# Altium schematic symbol library Connector-2.SchLib: 96 symbols (part 1 of 2)
Pins are listed as number, name and electrical type; pins without a type are passive.

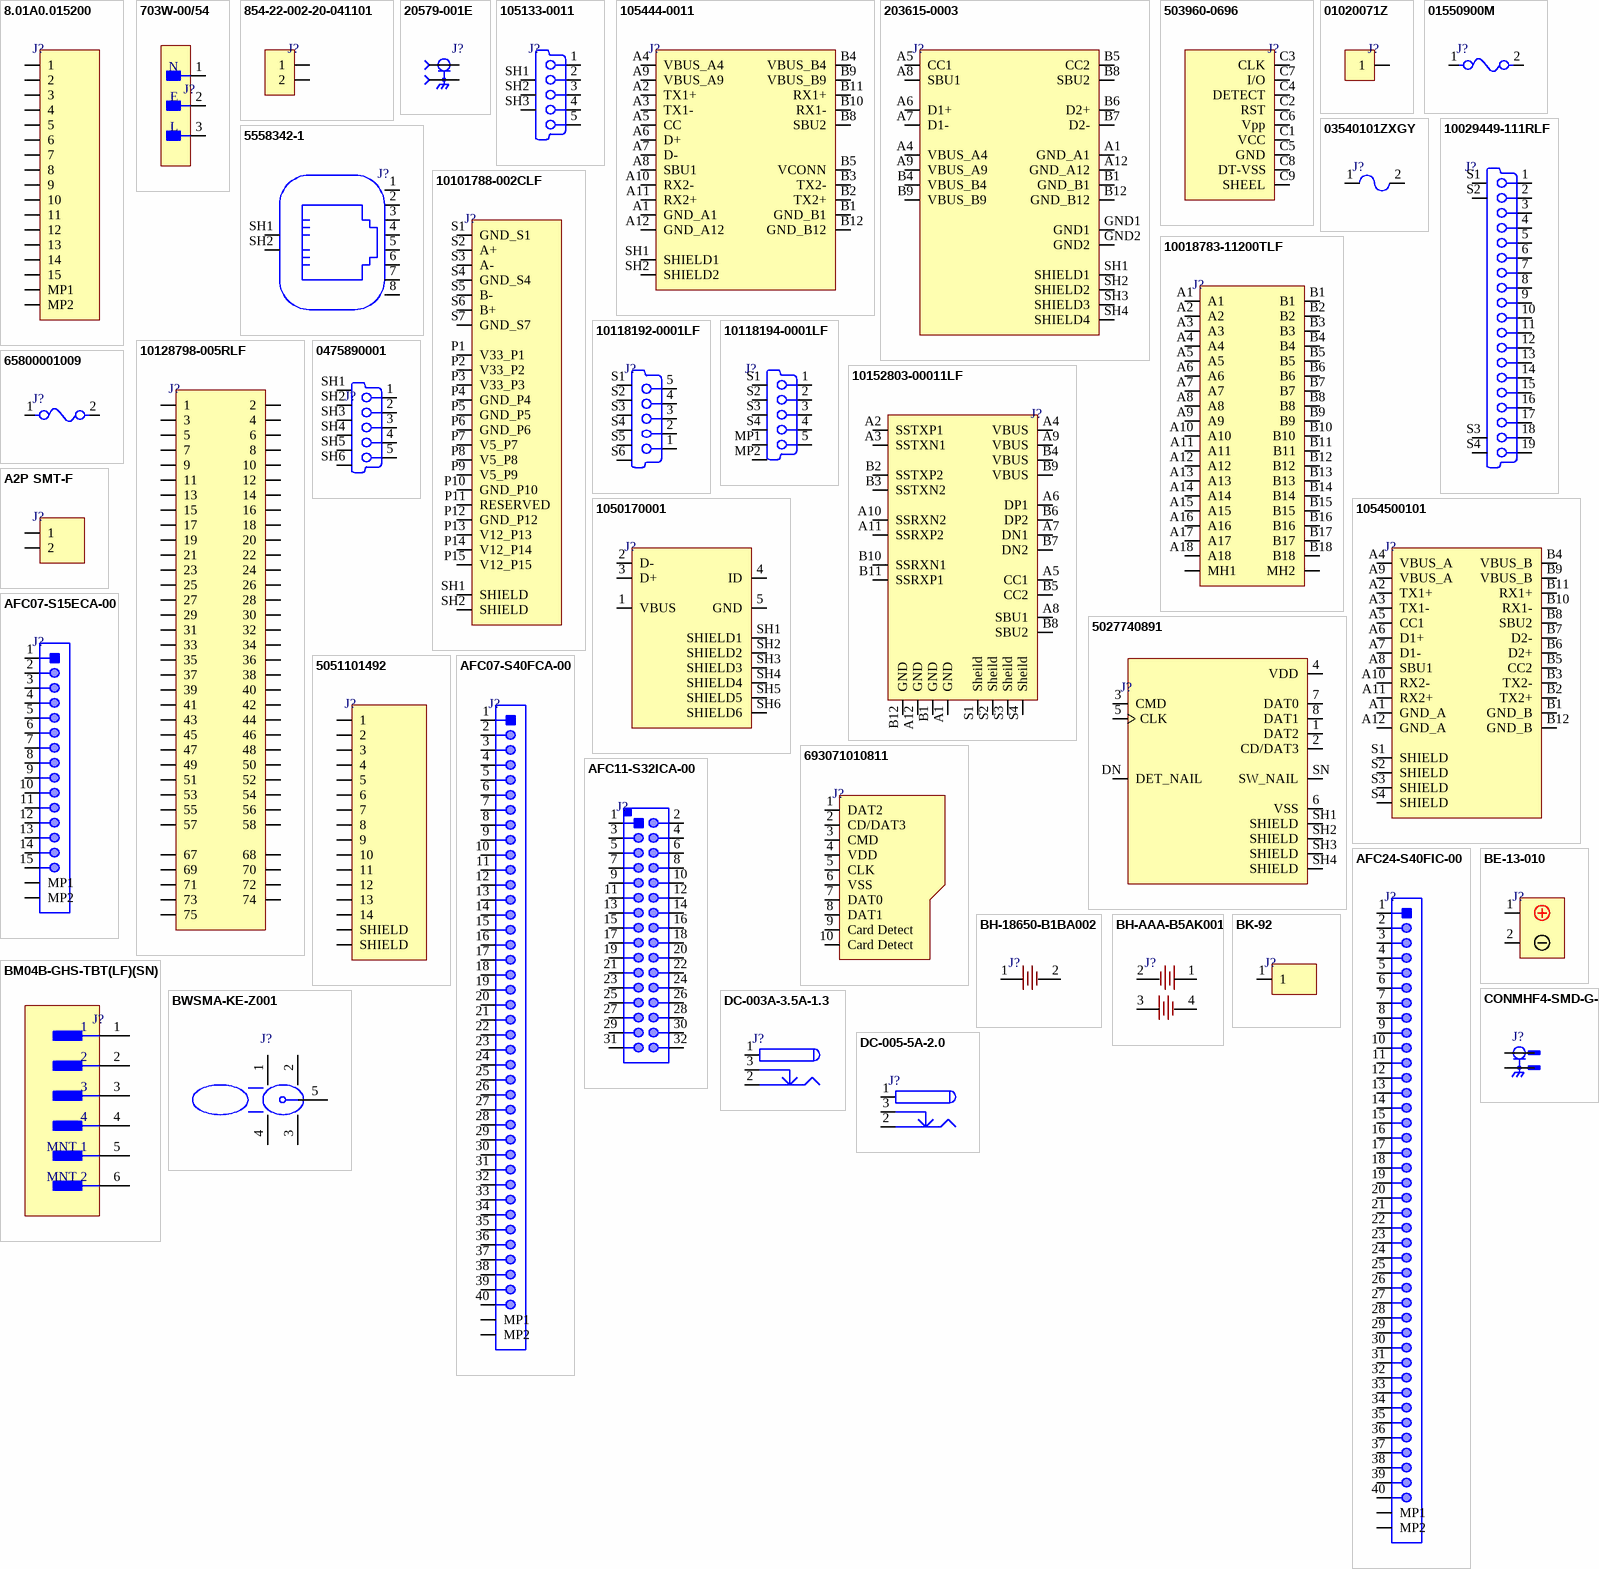
[diagram p0: symbols 8.01A0.015200 to DC-005-5A-2.0]

## 8.01A0.015200
designator J?
-40℃~+80℃ 15P Dual-sided contacts / top and bottom connection 0.5mm SMD,P=0.5mm,Surface Mount，Right Angle FFC, FPC (Flat Flexible) Connector Assemblies ROHS; Manufacturer: DIANWEI; Manufacturer Part Number: 8.01A0.015200; Item Type: FFC, FPC Connector; Package: SMD,P=0.5mm,Surface Mount，Right Angle; LCSC Part Number: C19188796; ComponentLink1Description: LCSC; ComponentLink1URL: https://www.lcsc.com/product-detail/FFC-FPC-Flat-Flexible-Connector-Assemblies_DIANWEI-8-01A0-015200_C19188796.html?s_z=n_HC-FPC-05-20-15RLTAG
footprint 8.01A0.015200
pins: 1, 2, 3, 4, 5, 6, 7, 8, 9, 10, 11, 12, 13, 14, 15, MP1, MP2

## 703W-00/54
designator J?
PWR ENT RCPT IEC320-C14 PNL SLDR; Manufacturer: Qualtek; Manufacturer Part Number: 703W-00/54; Item Type: Power Connectors; Supplier: Digikey; Supplier Part Number: Q220-ND; RoHS: Yes; Stock: 6999; Pricing: 1=2.02, 10=1.541, 25=1.3868, 50=1.282, 100=1.1867, 300=1.0531, 500=0.99762, 1000=0.92847, 2500=0.84695 (USD); ComponentLink1URL: https://datasheet.ciiva.com/1115/703w0054-1115060.pdf?src-supplier=Newark; ComponentLink1Description: https://datasheet.ciiva.com/1115/703w0054-1115060.pdf?src-supplier=Newark; ComponentLink2URL: https://datasheet.ciiva.com/12348/703w0054-56908-12348569.pdf?src-supplier=Mouser; ComponentLink2Description: https://datasheet.ciiva.com/12348/703w0054-56908-12348569.pdf?src-supplier=Mouser; ComponentLink3URL: https://datasheet.ciiva.com/16707/70133351-16707751.pdf?src-supplier=Allied+Electronics; ComponentLink3Description: https://datasheet.ciiva.com/16707/70133351-16707751.pdf?src-supplier=Allied+Electronics; ComponentLink4URL: https://datasheet.ciiva.com/691/703w0054-691309.pdf?src-supplier=Digikey; ComponentLink4Description: https://datasheet.ciiva.com/691/703w0054-691309.pdf?src-supplier=Digikey
footprint 703W-00/54
pins: 1 N, 2 E, 3 L

## 854-22-002-20-041101
designator J?
2 Position Spring Piston Connector Through Hole, Right Angle; Manufacturer: Mill-Max; Manufacturer Part Number: 854-22-002-20-041101; Item Type: Spring Loaded; Supplier: Digikey; Supplier Part Number: 54-854-22-002-20-041101-ND; RoHS: No; Pricing: 1=3.53, 10=3.002, 25=2.8136, 50=2.679, 100=2.551, 250=2.39124, 500=2.27716, 1000=2.16851, 2500=2.03287 (USD)
footprint 854-22-002-20-041101
pins: 1, 2

## 20579-001E
designator J?
MHF 4L RECEPTACLE; Manufacturer: I-PEX; Manufacturer Part Number: 20579-001E; Item Type: RF / Coaxial Connectors; Impedance: 50R; Number of Contacts: 1NUMBER; Voltage Rating: 60V; Supplier: Digikey; Supplier Part Number: 5378-20579-001ECT-ND; RoHS: No; Stock: 16372; Pricing: 1=1.4, 10=1.145, 25=1.0552, 50=0.992, 100=0.9328, 250=0.85996, 500=0.8087, 1000=0.76051, 2500=0.70122 (USD); Contact Material: 153,157ConductorMaterial; Min Operating Temperature: -40°C; Max Operating Temperature: 90°C; Height: 700um; ComponentLink1URL: http://datasheet.octopart.com/20579-001E-I-PEX-datasheet-154856145.pdf?src-supplier=Digikey; ComponentLink1Description: http://datasheet.octopart.com/20579-001E-I-PEX-datasheet-154856145.pdf?src-supplier=Digikey; ComponentLink2URL: https://datasheet.octopart.com/20579-001E-I-PEX-datasheet-154856145.pdf?src-supplier=Future+Electronics; ComponentLink2Description: https://datasheet.octopart.com/20579-001E-I-PEX-datasheet-154856145.pdf?src-supplier=Future+Electronics
footprint 20579-001E
pins: 1 SIGNAL, G1 GROUND, G2 GROUND, G3 GROUND

## 105133-0011
designator J?
CONN RCPT USB2.0 MICRO B SMD; Manufacturer: Molex; Manufacturer Part Number: 105133-0011; Connector Type: TELECOM AND DATACOM CONNECTOR; Option: General Purpose; Contact Resistance: 30mR; Contact Style: USB; Dielectric Withstanding Voltage (AC): 140V; Durability: 10000Cycles; Empty Shell: No; Insulation Resistance: 1GR; Number Of Connectors: 1; PCB Contact Pattern: RECTANGULAR; Polarization Key: POLARIZED HOUSING; Rated Current (Signal): 1A; Number of Contacts: 5; Body Breadth: 0.118inch; Body Depth: 0.264inch; Body Length: 0.315inch; Mounting Option 1: LOCKING; Reference Standard: UL; Reliability: COMMERCIAL; Item Type: USB B Connector; Supplier 1: Avnet; RoHS: Yes; Category: USB Connectors; Stock 1: 12800; Pricing 1: 500=1.01170 (USD); Mounting Technology: Board; Contact Material: Copper Alloy; Contact Finish - Mating: NOT SPECIFIED; Contact Finish - Termination: Gold (Au) - with Nickel (Ni) barrier; Insulation Material: Polyethylene; Shell Finish: Tin; Shell Material: Stainless Steel; Min Operating Temperature: -30°C; Max Operating Temperature: 85°C; JESD-609 Code: e4; Contact Gender: Female; Filter Feature: No; Mixed Contacts: No; Mounting Style: STRAIGHT; Number Of PCB Rows: 1; Termination: SMD/SMT; Terminal Pitch: 0.6604mm; Flammability Rating: UL94 V-0; Reach SVHC Compliant: Yes; RoHS Compliant: Yes; DIN Conformance: No; IEC Conformance: No; MIL Conformance: No; ComponentLink1URL: https://datasheet.ciiva.com:443/pdfs/VipMasterIC/IC/MOLE/MOLE-S-A0000025294/MOLE-S-A0000025294-1.pdf?src-supplier=IHS+Markit; ComponentLink1Description: https://datasheet.ciiva.com:443/pdfs/VipMasterIC/IC/MOLE/MOLE-S-A0000025294/MOLE-S-A0000025294-1.pdf?src-supplier=IHS+Markit; ComponentLink2URL: https://datasheet.ciiva.com/29660/1051330011-sd-29660273.pdf?src-supplier=Digi-Key; ComponentLink2Description: https://datasheet.ciiva.com/29660/1051330011-sd-29660273.pdf?src-supplier=Digi-Key; ComponentLink3URL: https://datasheet.ciiva.com/15181/getdatasheetpartid-719072-15181485.pdf?src-supplier=Verical; ComponentLink3Description: https://datasheet.ciiva.com/15181/getdatasheetpartid-719072-15181485.pdf?src-supplier=Verical; Supplier Part Number 1: 105133-0011; LCSC Part Number: C586226
footprint 1051330011
pins: 1 V BUS (5V) "USB Vcc [Red]", 2 D- "USB Data - [White]", 3 D+ "USB Data + [Green]", 4 ID, 5 GND "Ground [Black]", SH1 "Shell", SH2 "Shell", SH3 "Shell"

## 105444-0011
designator J?
CONN PLUG USB3.1 TYPEC BRD EDGE; Manufacturer: Molex; Manufacturer Part Number: 105444-0011; Item Type: Type-C Connector; Supplier: Mouser; Supplier Part Number: 538-105444-0011; RoHS: Yes; Category: USB Connectors; Stock: 9840; Pricing: 1=2.88, 10=2.46, 50=2.46, 100=2.07, 1000=1.69, 10000=1.55 (USD); ComponentLink1URL: http://www.molex.com/pdm_docs/sd/1054440011_sd.pdf?src-supplier=Digi-Key; ComponentLink1Description: http://www.molex.com/pdm_docs/sd/1054440011_sd.pdf?src-supplier=Digi-Key; LCSC Part Number: C561769
footprint 1054440011
pins: A1 GND_A1, A2 TX1+, A3 TX1-, A4 VBUS_A4, A5 CC, A6 D+, A7 D-, A8 SBU1, A9 VBUS_A9, A10 RX2-, A11 RX2+, A12 GND_A12, B1 GND_B1, B2 TX2+, B3 TX2-, B4 VBUS_B4, B5 VCONN, B8 SBU2, B9 VBUS_B9, B10 RX1-, B11 RX1+, B12 GND_B12, SH1 SHIELD1, SH2 SHIELD2

## 203615-0003
designator J?
USB C RECEPTACLE, 16PIN; Manufacturer: Molex; Manufacturer Part Number: 203615-0003; Item Type: Connectors; Dielectric Material: 4303ConductorMaterial; Contact Resistance: 50mR; Current Rating: 5A; Insulation Resistance: 100MR; Number of Ports: 1NUMBER; Plating Thickness: 762nm; Row Spacing: 1.25mm; Supplier: Mouser; Supplier Part Number: 538-203615-0003; RoHS: No; Stock: 9511; Pricing: 1=3.44, 10=2.81, 50=2.43, 100=2.29, 1000=2.01, 10000=1.99 (USD); Pins: 16NUMBER; Shell Finish: 153ConductorMaterial; Shell Material: 156ConductorMaterial; Min Operating Temperature: -40°C; Max Operating Temperature: 85°C; Contact Gender: 30Gender; Number of Rows: 2NUMBER; Terminal Pitch: 500um; Reach SVHC Compliant: 4188SVHC; ComponentLink1URL: https://datasheet.octopart.com/203615-0003-Molex-datasheet-176111458.pdf?src-supplier=Farnell; ComponentLink1Description: https://datasheet.octopart.com/203615-0003-Molex-datasheet-176111458.pdf?src-supplier=Farnell; ComponentLink2URL: https://datasheet.octopart.com/203615-0003-Molex-datasheet-176111458.pdf?src-supplier=Element14; ComponentLink2Description: https://datasheet.octopart.com/203615-0003-Molex-datasheet-176111458.pdf?src-supplier=Element14
footprint 2036150003
pins: A1 GND_A1, A4 VBUS_A4, A5 CC1, A6 D1+, A7 D1-, A8 SBU1, A9 VBUS_A9, A12 GND_A12, B1 GND_B1, B4 VBUS_B4, B5 CC2, B6 D2+, B7 D2-, B8 SBU2, B9 VBUS_B9, B12 GND_B12, GND1, GND2, SH1 SHIELD1, SH2 SHIELD2, SH3 SHIELD3, SH4 SHIELD4

## 503960-0696
designator J?
CONN MICRO SIMM PUSH-PUSH R/A; Manufacturer: Molex; Manufacturer Part Number: 503960-0696; Item Type: Memory Connectors; Plating: Gold; Current Rating: 500mA; Number of Circuits: 6; Number of Contacts: 8; Voltage Rating: 10V; Supplier: Arrow Electronics; LCSC Part Number: C132719; RoHS: Yes; Stock: 4105; Pricing: 1=1.7339, 10=1.4783, 25=1.4697, 50=1.441, 100=1.3312, 250=1.3227, 500=1.2003, 1600=1.1948, 3200=1.1943 (USD); Contact Material: Nickel,Gold; Contact Plating: Gold; Housing Material: Stainless Steel; Min Operating Temperature: -25°C; Max Operating Temperature: 85°C; Height: 1.5mm; RoHS Compliant: Yes; ComponentLink1URL: http://datasheet.octopart.com/5039600696-Molex-datasheet-148167723.pdf?src-supplier=Rs; ComponentLink1Description: http://datasheet.octopart.com/5039600696-Molex-datasheet-148167723.pdf?src-supplier=Rs; ComponentLink2URL: http://datasheet.octopart.com/5039600696-Molex-datasheet-148167723.pdf?src-supplier=Farnell; ComponentLink2Description: http://datasheet.octopart.com/5039600696-Molex-datasheet-148167723.pdf?src-supplier=Farnell; ComponentLink3URL: http://datasheet.octopart.com/5039600696-Molex-datasheet-148167723.pdf?src-supplier=Avnet; ComponentLink3Description: http://datasheet.octopart.com/5039600696-Molex-datasheet-148167723.pdf?src-supplier=Avnet; ComponentLink4URL: http://datasheet.octopart.com/5039600696-Molex-datasheet-148167723.pdf?src-supplier=Arrow+Electronics; ComponentLink4Description: http://datasheet.octopart.com/5039600696-Molex-datasheet-148167723.pdf?src-supplier=Arrow+Electronics; ComponentLink5URL: http://datasheet.octopart.com/5039600696-Molex-datasheet-148167723.pdf?src-supplier=Onlinecomponents.com; ComponentLink5Description: http://datasheet.octopart.com/5039600696-Molex-datasheet-148167723.pdf?src-supplier=Onlinecomponents.com; ComponentLink6URL: http://datasheet.octopart.com/5039600696-Molex-datasheet-148167723.pdf?src-supplier=Verical; ComponentLink6Description: http://datasheet.octopart.com/5039600696-Molex-datasheet-148167723.pdf?src-supplier=Verical; ComponentLink7URL: http://datasheet.octopart.com/5039600696-Molex-datasheet-148167723.pdf?src-supplier=Electro+Sonic; ComponentLink7Description: http://datasheet.octopart.com/5039600696-Molex-datasheet-148167723.pdf?src-supplier=Electro+Sonic
footprint 5039600696
pins: C1 VCC, C2 RST, C3 CLK, C4 DETECT, C5 GND, C6 Vpp, C7 I/O, C8 DT-VSS, C9 SHEEL

## 01020071Z
designator J?
FUSE CLIP CARTRIDGE 250V 15A PCB; Manufacturer: Littelfuse; Manufacturer Part Number: 01020071Z; Item Type: Fuse Holder; Supplier: Digikey; LCSC Part Number: C142745; RoHS: Yes; Stock: 48674; Pricing: 1=0.27, 5=0.228, 10=0.21, 50=0.1754, 100=0.1622, 250=0.14612, 500=0.13502, 1000=0.12473, 5000=0.1036 (USD); Lead Free: 5697LeadFree; ComponentLink1URL: https://datasheet.ciiva.com/30471/0900766b8128f6e8-30471828.pdf?src-supplier=Rs; ComponentLink1Description: https://datasheet.ciiva.com/30471/0900766b8128f6e8-30471828.pdf?src-supplier=Rs; ComponentLink2URL: https://datasheet.ciiva.com/14119/102-series-eng-tds-14119839.pdf?src-supplier=Distrelec; ComponentLink2Description: https://datasheet.ciiva.com/14119/102-series-eng-tds-14119839.pdf?src-supplier=Distrelec; ComponentLink3URL: https://datasheet.ciiva.com/1269/1480080-1269262.pdf?src-supplier=Element14; ComponentLink3Description: https://datasheet.ciiva.com/1269/1480080-1269262.pdf?src-supplier=Element14; ComponentLink4URL: https://datasheet.ciiva.com/1270/littelfuse-fuse-clips-1270929.pdf?src-supplier=Element14; ComponentLink4Description: https://datasheet.ciiva.com/1270/littelfuse-fuse-clips-1270929.pdf?src-supplier=Element14; ComponentLink5URL: https://datasheet.ciiva.com/295/littelfuse-fuse-clips-295516.pdf?src-supplier=Digikey; ComponentLink5Description: https://datasheet.ciiva.com/295/littelfuse-fuse-clips-295516.pdf?src-supplier=Digikey; ComponentLink6URL: https://datasheet.ciiva.com/15201/getdatasheetpartid-336939-15201068.pdf?src-supplier=Verical; ComponentLink6Description: https://datasheet.ciiva.com/15201/getdatasheetpartid-336939-15201068.pdf?src-supplier=Verical
footprint 01020071Z
pins: 1

## 01550900M
designator J?
FUSE BLOK CARTRIDGE 125V 10A SMD; Manufacturer: Littelfuse; Manufacturer Part Number: 01550900M; Item Type: Fuse Holders; Supplier: Digikey; LCSC Part Number: C108518; RoHS: Yes; Stock: 4038; Pricing: 1=2.5, 5=2.072, 10=1.912, 50=1.586, 100=1.4631, 250=1.31448, 500=1.21164, 1000=1.11633, 5000=1.06138 (USD); Lead Free: 5697LeadFree; Reach SVHC Compliant: 4187SVHC; ComponentLink1URL: https://datasheet.ciiva.com/3812/01550900m-3812998.pdf?src-supplier=Arrow+Electronics; ComponentLink1Description: https://datasheet.ciiva.com/3812/01550900m-3812998.pdf?src-supplier=Arrow+Electronics
footprint 01550900M
pins: 1, 2

## 03540101ZXGY
designator J?
FUSE BLOCK CART 600V 15A PCB; Manufacturer: Littelfuse; Manufacturer Part Number: 03540101ZXGY; Body Material: Bronze,Tin; Voltage Rating: 300V; Number of Poles: 1; Fuse Size: 0.25 Dia x 1.26 L (6.35mm x 32mm); Supplier: Rs; Supplier Part Number: 1740648; RoHS: Yes; Category: Fuse Holders; Stock: 169; Mounting Technology: Through Hole; Case/Package: 300; Contact Material: Bronze; Contact Plating: Tin; Material: Thermoplastic; Color: Grey; Min Operating Temperature: -40°C; Max Operating Temperature: 85°C; Current Rating: 15A; Package Quantity: 50; Packaging: Bulk; Voltage Rating (DC): 300V; Voltage Rating (AC): 300V; Number of Circuits: 1; Voltage: 600V; Termination: PC Pin; Fuse Current: 15A; Orientation: Horizontal; Series: OMNI-BLOK® 354; Length: 12.7mm; Width: 12.7mm; Depth: 35.56mm; Reach SVHC Compliant: No; Lead Free: Lead Free; Flammability Rating: UL94 V-0; ComponentLink1URL: https://datasheet.ciiva.com/15187/getdatasheetpartid-114928-15187899.pdf?src-supplier=Verical; ComponentLink1Description: https://datasheet.ciiva.com/15187/getdatasheetpartid-114928-15187899.pdf?src-supplier=Verical; ComponentLink2URL: https://datasheet.ciiva.com/16208/354-omniblok-16208437.pdf?src-supplier=Future+Electronics; ComponentLink2Description: https://datasheet.ciiva.com/16208/354-omniblok-16208437.pdf?src-supplier=Future+Electronics; ComponentLink3URL: https://datasheet.ciiva.com/1269/354-omniblok-1269606.pdf?src-supplier=Element14; ComponentLink3Description: https://datasheet.ciiva.com/1269/354-omniblok-1269606.pdf?src-supplier=Element14
footprint 03540101ZXGY
pins: 1, 2

## 5558342-1
designator J?
CONN MOD JACK 8P8C R/A SHIELDED; Manufacturer: TE Connectivity; Manufacturer Part Number: 5558342-1; Item Type: Ethernet Connectors; Current Rating: 200mA; Circuit Application: 5778ConnectorType; Plating Thickness: 1.27um; Supplier: Future Electronics; LCSC Part Number: C305973; RoHS: No; Stock: 5400; Pricing: 1=2.48, 25=2.38, 75=2.32, 90=2.34, 180=2.3, 200=2.26, 270=2.28, 450=2.25, 500=2.15, 900=2.19 (USD); Lead Free: 5697LeadFree; ComponentLink1URL: https://datasheet.ciiva.com/8007/1637342-8007798.pdf?src-supplier=Element14; ComponentLink1Description: https://datasheet.ciiva.com/8007/1637342-8007798.pdf?src-supplier=Element14; ComponentLink2URL: https://datasheet.ciiva.com/15170/getdatasheetpartid-155261-15170633.pdf?src-supplier=Verical; ComponentLink2Description: https://datasheet.ciiva.com/15170/getdatasheetpartid-155261-15170633.pdf?src-supplier=Verical; ComponentLink3URL: https://datasheet.ciiva.com/30494/0900766b8121ec01-30494367.pdf?src-supplier=Rs; ComponentLink3Description: https://datasheet.ciiva.com/30494/0900766b8121ec01-30494367.pdf?src-supplier=Rs; ComponentLink4URL: https://datasheet.ciiva.com/685/eng-cd-5558342-f-basefilename-685330.pdf?src-supplier=Digikey; ComponentLink4Description: https://datasheet.ciiva.com/685/eng-cd-5558342-f-basefilename-685330.pdf?src-supplier=Digikey; ComponentLink5URL: https://datasheet.ciiva.com/19457/958999-19457716.pdf?src-supplier=Jameco; ComponentLink5Description: https://datasheet.ciiva.com/19457/958999-19457716.pdf?src-supplier=Jameco; ComponentLink6URL: https://datasheet.ciiva.com/14618/70042946-14618796.pdf?src-supplier=Allied+Electronics; ComponentLink6Description: https://datasheet.ciiva.com/14618/70042946-14618796.pdf?src-supplier=Allied+Electronics; ComponentLink7URL: https://datasheet.ciiva.com/30242/eng-cs-82066-mod-jacks-and-mrj21-prod-single-1107-30242663.pdf?src-supplier=Onlinecomponents.com; ComponentLink7Description: https://datasheet.ciiva.com/30242/eng-cs-82066-mod-jacks-and-mrj21-prod-single-1107-30242663.pdf?src-supplier=Onlinecomponents.com; ComponentLink8URL: https://datasheet.ciiva.com/3138/eng-cs-82066-mod-jacks-and-mrj21-prod-single-1107-3138695.pdf?src-supplier=Avnet; ComponentLink8Description: https://datasheet.ciiva.com/3138/eng-cs-82066-mod-jacks-and-mrj21-prod-single-1107-3138695.pdf?src-supplier=Avnet
footprint 5558342-1
pins: 1, 2, 3, 4, 5, 6, 7, 8, SH1 SHIELD, SH2 SHIELD

## 10018783-11200TLF
designator J?
CONN PCI EXP FEMALE 36POS 0.039; Manufacturer: Amphenol ICC / FCI; Manufacturer Part Number: 10018783-11200TLF; Current Rating: 1.1A; Voltage Rating (AC): 300V; Number of Positions: 36; Insulation Resistance: 1GR; Connector Type: Cantilever; Pitch: 2mm; Board Thickness: 1.56mm; Card Thickness: 0.062inch; Item Type: Connector; Supplier 1: Digi-Key; Stock 1: 0; Pricing 1: 8400=0.19689 (USD); Mount: Through Hole; Contact Material: Copper Alloy; Contact Plating: Gold,Tin,Matte; Color: Black; Housing Color: Black; Housing Material: Nylon; Insulation Material: Nylon; Min Operating Temperature: -55°C; Max Operating Temperature: 85°C; Package Quantity: 70; Packaging: Tray; Gender: Female; Number of Rows: 2; Termination: Solder; Max Voltage Rating (AC): 300V; Orientation: Straight; Series: HPCE™; Contact Type: Cantilever; Length: 25mm; Width: 7.4mm; Lead Free: Lead Free; Flammability Rating: UL94 V-0; RoHS Compliant: Yes; ComponentLink1URL: http://portal.fciconnect.com/Comergent/fci/drawing/10018783.pdf?src-supplier=Avnet; ComponentLink1Description: http://portal.fciconnect.com/Comergent/fci/drawing/10018783.pdf?src-supplier=Avnet; ComponentLink2URL: https://cdn.amphenol-icc.com/media/wysiwyg/files/documentation/gs-12-233.pdf?src-supplier=Digi-Key; ComponentLink2Description: https://cdn.amphenol-icc.com/media/wysiwyg/files/documentation/gs-12-233.pdf?src-supplier=Digi-Key; ComponentLink3URL: http://portal.fciconnect.com/Comergent/en/US/adirect/fci?cmd=catProductDetail&showAddButton=true&productID=1001878311200TLF&src-supplier=Mouser; ComponentLink3Description: http://portal.fciconnect.com/Comergent/en/US/adirect/fci?cmd=catProductDetail&showAddButton=true&productID=1001878311200TLF&src-supplier=Mouser; Supplier Part Number 1: 609-1998-ND; LCSC Part Number: C4689032
footprint 10018783_11200TLF
pins: A1, A2, A3, A4, A5, A6, A7, A8, A9, A10, A11, A12, A13, A14, A15, A16, A17, A18, B1, B2, B3, B4, B5, B6, B7, B8, B9, B10, B11, B12, B13, B14, B15, B16, B17, B18, MH1, MH2

## 10029449-111RLF
designator J?
CONN RCPT 1.4 HDMI 19POS SMD R/A; Manufacturer: Amphenol ICC / FCI; Manufacturer Part Number: 10029449-111RLF; Item Type: HDMI Connector; Supplier 1: RSComponents; RoHS: No; Category: Audio / Video Connectors; Stock 1: 6150; Pricing 1: 1=1471.56000 (GBP); ComponentLink1URL: https://www.verical.com/server-webapp/html/getDatasheet?partID=416866&src-supplier=Verical; ComponentLink1Description: https://www.verical.com/server-webapp/html/getDatasheet?partID=416866&src-supplier=Verical; ComponentLink2URL: http://components.arrow.com/part/dataview/51683435S9285512N8314?src-supplier=Arrow+Electronics; ComponentLink2Description: http://components.arrow.com/part/dataview/51683435S9285512N8314?src-supplier=Arrow+Electronics; ComponentLink3URL: http://portal.fciconnect.com/Comergent/en/US/adirect/fci?cmd=catProductDetail&showAddButton=true&productID=10029449111RLF&src-supplier=Mouser; ComponentLink3Description: http://portal.fciconnect.com/Comergent/en/US/adirect/fci?cmd=catProductDetail&showAddButton=true&productID=10029449111RLF&src-supplier=Mouser; ComponentLink4URL: http://www.amphenol-icc.com/media/wysiwyg/files/drawing/10029449.pdf?src-supplier=Digi-Key; ComponentLink4Description: http://www.amphenol-icc.com/media/wysiwyg/files/drawing/10029449.pdf?src-supplier=Digi-Key; ComponentLink5URL: http://www.farnell.com/datasheets/2562284.pdf?src-supplier=Farnell; ComponentLink5Description: http://www.farnell.com/datasheets/2562284.pdf?src-supplier=Farnell; Supplier Part Number 1: 1822113; LCSC Part Number: C427307
footprint 10029449-111RLF
pins: 1, 2, 3, 4, 5, 6, 7, 8, 9, 10, 11, 12, 13, 14, 15, 16, 17, 18, 19, S1 Shield "Shell", S2 Shield "Shell", S3 Shield "Shell", S4 Shield "Shell"

## 10101788-002CLF
designator J?
CONN SATA PLUG 22POS SLD R/A SMD; Manufacturer: Amphenol ICC / FCI; Manufacturer Part Number: 10101788-002CLF; Item Type: Card Edge Connectors; Current Rating: 1.5A; Gender: Male; Voltage Rating (AC): 500V; Connector Type: Plug,SATA; Number of Positions: 22; Insulation Resistance: 1GR; Supplier: Avnet; Supplier Part Number: 65AC5284; RoHS: Yes; Stock: 1356; Pricing: 1=4.46, 10=4.01, 25=3.86, 50=3.72, 100=3.57 (USD); Mounting Technology: Surface Mount; Color: Black; Contact Plating: Gold; Contact Material: Copper Alloy; Housing Material: Thermoplastic; Package Quantity: 550; Packaging: Tape and Reel; Termination: Solder; Number of Contacts: 22; Orientation: Right Angle; Series: -; Radiation Hardening: No; Lead Free: Lead Free; Flammability Rating: UL94 V-0; RoHS Compliant: Yes; ComponentLink1URL: https://datasheet.ciiva.com/3129/10101788-3129796.pdf?src-supplier=Avnet; ComponentLink1Description: https://datasheet.ciiva.com/3129/10101788-3129796.pdf?src-supplier=Avnet
footprint 10101788-002CLF
pins: P1 V33_P1, P2 V33_P2, P3 V33_P3, P4 GND_P4, P5 GND_P5, P6 GND_P6, P7 V5_P7, P8 V5_P8, P9 V5_P9, P10 GND_P10, P11 RESERVED, P12 GND_P12, P13 V12_P13, P14 V12_P14, P15 V12_P15, S1 GND_S1, S2 A+, S3 A-, S4 GND_S4, S5 B-, S6 B+, S7 GND_S7, SH1 SHIELD, SH2 SHIELD

## 10118192-0001LF
designator J?
CONN RCPT USB2.0 MICRO B SMD R/A; Manufacturer: Amphenol FCI; Manufacturer Part Number: 10118192-0001LF; Gender: Receptacle; Current Rating: 1.8A; Connector Type: USB,Receptacle; Number of Contacts: 5; Number of Ports: 1; Insulation Resistance: 1GR; Max Voltage Rating (AC): 100V; Pitch: 0.65mm; Item Type: USB Connector; Supplier 1: Digi-Key; Stock 1: 32977; Pricing 1: 1=0.43, 10=0.405, 25=0.3648, 50=0.3242, 100=0.3107, 250=0.28368, 500=0.27016 (USD); Mount: Surface Mount,Horizontal; Contact Plating: Gold; Contact Material: Copper Alloy; Color: Black; Number of Terminals: 5; Housing Material: Polymer; Min Operating Temperature: -55°C; Max Operating Temperature: 85°C; Termination: Solder; Packaging: Tape and Reel; Orientation: Right Angle; Package Quantity: 1400; Features: Shielded; Voltage Rating: 100V; USB Standard: USB 2.0; Length: 7.86mm; Depth: 5.57mm; Radiation Hardening: No; Flammability Rating: UL94 V-0; Lead Free: Lead Free; REACH SVHC: No SVHC; ComponentLink1URL: https://cdn.amphenol-icc.com/media/wysiwyg/files/documentation/datasheet/inputoutput/io_usb_micro.pdf?src-supplier=Verical; ComponentLink1Description: https://cdn.amphenol-icc.com/media/wysiwyg/files/documentation/datasheet/inputoutput/io_usb_micro.pdf?src-supplier=Verical; ComponentLink2URL: http://www.amphenol-icc.com/media/wysiwyg/files/drawing/10118192.pdf?src-supplier=Digi-Key; ComponentLink2Description: http://www.amphenol-icc.com/media/wysiwyg/files/drawing/10118192.pdf?src-supplier=Digi-Key; ComponentLink3URL: https://cdn.amphenol-icc.com/media/wysiwyg/files/documentation/datasheet/inputoutput/io_usb_micro.pdf?src-supplier=Mouser; ComponentLink3Description: https://cdn.amphenol-icc.com/media/wysiwyg/files/documentation/datasheet/inputoutput/io_usb_micro.pdf?src-supplier=Mouser; Supplier Part Number 1: 609-4613-6-ND; LCSC Part Number: C132564
footprint 10118192-0001LF_ (CONN RCPT USB2.0 MICRO B SMD R/A)
pins: 1 V BUS (5V) "USB Vcc [Red]", 2 D- "USB Data - [White]", 3 D+ "USB Data + [Green]", 4 NC "Not Connected (or joined to pin 5 via resistor)", 5 GND "Ground [Black]", S1 Shield "Shell", S2 Shield "Shell", S3 Shield "Shell", S4 Shield "Shell", S5 Shield "Shell", S6 Shield "Shell"

## 10118194-0001LF
designator J?
CONN RCPT USB2.0 MICRO B SMD R/A; Manufacturer: Amphenol FCI; Manufacturer Part Number: 10118194-0001LF; Gender: Receptacle; Current Rating: 1.8A; Connector Type: USB,Receptacle; Number of Contacts: 5; Insulation Resistance: 1GR; Number of Ports: 1; Max Voltage Rating (AC): 100V; Pitch: 0.65mm; Item Type: USB B Connector; Supplier 1: Digi-Key; Stock 1: 35943; Pricing 1: 1=0.43, 10=0.405, 25=0.3648, 50=0.3242, 100=0.3107, 250=0.28368, 500=0.27016 (USD); Mount: Surface Mount,Horizontal; Color: Black; Contact Material: Copper Alloy; Contact Plating: Gold; Number of Terminals: 5; Housing Material: Polymer; Min Operating Temperature: -55°C; Max Operating Temperature: 85°C; Package Quantity: 9600; Packaging: Tape and Reel; Termination: Solder; Orientation: Right Angle; Features: Shielded; Length: 8.05mm; Depth: 5mm; Radiation Hardening: No; Lead Free: Lead Free; Flammability Rating: UL94 V-0; ComponentLink1URL: http://www.amphenol-icc.com/media/wysiwyg/files/drawing/10118194.pdf?src-supplier=Digi-Key; ComponentLink1Description: http://www.amphenol-icc.com/media/wysiwyg/files/drawing/10118194.pdf?src-supplier=Digi-Key; ComponentLink2URL: https://cdn.amphenol-icc.com/media/wysiwyg/files/drawing/10118194.pdf?src-supplier=Mouser; ComponentLink2Description: https://cdn.amphenol-icc.com/media/wysiwyg/files/drawing/10118194.pdf?src-supplier=Mouser; ComponentLink3URL: https://cdn.amphenol-icc.com/media/wysiwyg/files/drawing/10118194.pdf?src-supplier=Verical; ComponentLink3Description: https://cdn.amphenol-icc.com/media/wysiwyg/files/drawing/10118194.pdf?src-supplier=Verical; Supplier Part Number 1: 609-4618-1-ND; LCSC Part Number: C132563
footprint 10118194-0001LF_
pins: 1 V BUS (5V) "USB Vcc [Red]", 2 D- "USB Data - [White]", 3 D+ "USB Data + [Green]", 4 NC "Not Connected (or joined to pin 5 via resistor)", 5 GND "Ground [Black]", MP1 Tab "Shell", MP2 Tab "Shell", S1 Shield "Shell", S2 Shield "Shell", S3 Shield "Shell", S4 Shield "Shell"

## 10128798-005RLF
designator J?
CONN M.2 FMALE 75POS 0.020 GOLD; Manufacturer: Amphenol ICC / FCI; Manufacturer Part Number: 10128798-005RLF; Item Type: Card Edge Connectors; Supplier: Digikey; LCSC Part Number: C4965805; RoHS: No; Stock: 900; Pricing: 900=1.79297, 1800=1.70744, 2700=1.65933, 4500=1.60066, 6300=1.56316 (USD); ComponentLink1URL: https://datasheet.octopart.com/10128798-005RLF-Amphenol-Communications-Solutions-datasheet-100454230.pdf?src-supplier=Newark; ComponentLink1Description: https://datasheet.octopart.com/10128798-005RLF-Amphenol-Communications-Solutions-datasheet-100454230.pdf?src-supplier=Newark; ComponentLink2URL: https://datasheet.octopart.com/10128798-005RLF-Amphenol-Communications-Solutions-datasheet-154727268.pdf?src-supplier=Electro+Sonic; ComponentLink2Description: https://datasheet.octopart.com/10128798-005RLF-Amphenol-Communications-Solutions-datasheet-154727268.pdf?src-supplier=Electro+Sonic
footprint 10128798-005RLF
pins: 1, 2, 3, 4, 5, 6, 7, 8, 9, 10, 11, 12, 13, 14, 15, 16, 17, 18, 19, 20, 21, 22, 23, 24, 25, 26, 27, 28, 29, 30, 31, 32, 33, 34, 35, 36, 37, 38, 39, 40, 41, 42, 43, 44, 45, 46, 47, 48, 49, 50, 51, 52, 53, 54, 55, 56, 57, 58, 67, 68, 69, 70, 71, 72, 73, 74, 75

## 10152803-00011LF
designator J?
USB 3.2 TYPE C GEN 2 RECEPTACLE; Manufacturer: Amphenol Communications Solutions; Manufacturer Part Number: 10152803-00011LF; Item Type: Connector; Supplier: Digikey; Supplier Part Number: 609-10152803-00011LFCT-ND; RoHS: No; Category: Connectors; Stock: 452; Pricing: 1=1.08, 10=0.914, 25=0.8568, 50=0.8156, 100=0.7767, 250=0.728 (USD); LCSC Part Number: C5410523
footprint 10152803-00011LF
pins: A1 GND, A2 SSTXP1, A3 SSTXN1, A4 VBUS, A5 CC1, A6 DP1, A7 DN1, A8 SBU1, A9 VBUS, A10 SSRXN2, A11 SSRXP2, A12 GND, B1 GND, B2 SSTXP2, B3 SSTXN2, B4 VBUS, B5 CC2, B6 DP2, B7 DN2, B8 SBU2, B9 VBUS, B10 SSRXN1, B11 SSRXP1, B12 GND, S1 Sheild, S2 Sheild, S3 Sheild, S4 Sheild

## 0475890001
designator J?
CONN RCPT MICRO USB AB 5P SMD RA; Manufacturer: Molex; Manufacturer Part Number: 0475890001; Item Type: USB Connectors; Plating: 157ConductorMaterial; Number of Circuits: 5NUMBER; Supplier: Mouser; LCSC Part Number: C114094; RoHS: Yes; Stock: 26016; Pricing: 1=0.89, 10=0.579, 50=0.579, 100=0.491, 1000=0.46, 10000=0.421 (USD); Number of Rows: 1NUMBER; ComponentLink1URL: https://datasheet.ciiva.com/15181/getdatasheetpartid-158670-15181214.pdf?src-supplier=Verical; ComponentLink1Description: https://datasheet.ciiva.com/15181/getdatasheetpartid-158670-15181214.pdf?src-supplier=Verical; ComponentLink2URL: https://datasheet.ciiva.com/16148/0475890001-io-connectors-16148921.pdf?src-supplier=Onlinecomponents.com; ComponentLink2Description: https://datasheet.ciiva.com/16148/0475890001-io-connectors-16148921.pdf?src-supplier=Onlinecomponents.com; ComponentLink3URL: https://datasheet.ciiva.com/11731/0900766b80dfe0a8-11731295.pdf?src-supplier=Rs; ComponentLink3Description: https://datasheet.ciiva.com/11731/0900766b80dfe0a8-11731295.pdf?src-supplier=Rs; ComponentLink4URL: https://datasheet.ciiva.com/1098/1597783-1098478.pdf?src-supplier=Element14; ComponentLink4Description: https://datasheet.ciiva.com/1098/1597783-1098478.pdf?src-supplier=Element14; ComponentLink5URL: https://datasheet.ciiva.com/32371/0475890001-io-connectors-32371755.pdf?src-supplier=Onlinecomponents.com; ComponentLink5Description: https://datasheet.ciiva.com/32371/0475890001-io-connectors-32371755.pdf?src-supplier=Onlinecomponents.com
footprint 0475890001
pins: 1 V BUS (5V) "USB Vcc [Red]", 2 D- "USB Data - [White]", 3 D+ "USB Data + [Green]", 4 ID, 5 GND "Ground [Black]", SH1 "Shell", SH2 "Shell", SH3 "Shell", SH4 "Shell", SH5 "Shell", SH6 "Shell"

## 1050170001
designator J?
CONN RCPT USB2.0 MICRO B SMD R/A; Manufacturer: Molex; Manufacturer Part Number: 1050170001; Item Type: USB Connectors; Plating: 157ConductorMaterial; Gender: Receptacle; Current Rating: 1.8A; Connector Type: USB; Number of Ports: 1; Number of Contacts: 5; Max Voltage Rating (AC): 30V; Pitch: 0.65mm; Supplier: Mouser; LCSC Part Number: C136000; RoHS: Yes; Stock: 21424; Pricing: 1=1.01, 10=0.84, 50=0.84, 100=0.7, 1000=0.56, 10000=0.495 (USD); Mounting Technology: Surface Mount; Contact Plating: Gold; Contact Material: Copper Alloy,Copper; Housing Material: Polymer; Min Operating Temperature: -30°C; Max Operating Temperature: 85°C; Packaging: Tape and Reel; Termination: Solder; Voltage Rating: 30V; Number of Positions: 5; Orientation: Right Angle; Number of Circuits: 5; USB Standard: USB 2.0; Series: 105017; Number of Rows: 1NUMBER; Length: 8.2mm; Depth: 7.5mm; RoHS Compliant: Yes; Reach SVHC Compliant: Unknown; Halogen Free: 5696HalogenFree; ComponentLink1URL: https://datasheet.ciiva.com/3094/1050170001-io-connectors-3094416.pdf?src-supplier=Avnet; ComponentLink1Description: https://datasheet.ciiva.com/3094/1050170001-io-connectors-3094416.pdf?src-supplier=Avnet; ComponentLink2URL: https://datasheet.ciiva.com/4598/1050170001-io-connectors-152207-4598759.pdf?src-supplier=Mouser; ComponentLink2Description: https://datasheet.ciiva.com/4598/1050170001-io-connectors-152207-4598759.pdf?src-supplier=Mouser; ComponentLink3URL: https://datasheet.ciiva.com/851/1050170001-sd-851276.pdf?src-supplier=Digikey; ComponentLink3Description: https://datasheet.ciiva.com/851/1050170001-sd-851276.pdf?src-supplier=Digikey; ComponentLink4URL: https://datasheet.ciiva.com/851/1050170001-sd-851277.pdf?src-supplier=Digikey; ComponentLink4Description: https://datasheet.ciiva.com/851/1050170001-sd-851277.pdf?src-supplier=Digikey; ComponentLink5URL: https://datasheet.ciiva.com/851/1050170001-sd-851278.pdf?src-supplier=Digikey; ComponentLink5Description: https://datasheet.ciiva.com/851/1050170001-sd-851278.pdf?src-supplier=Digikey; ComponentLink6URL: https://datasheet.ciiva.com/16668/1050170001-io-connectors-16668598.pdf?; ComponentLink6Description: https://datasheet.ciiva.com/16668/1050170001-io-connectors-16668598.pdf?
footprint 1050170001
pins: 1 VBUS, 2 D-, 3 D+, 4 ID, 5 GND, SH1 SHIELD1, SH2 SHIELD2, SH3 SHIELD3, SH4 SHIELD4, SH5 SHIELD5, SH6 SHIELD6

## 1054500101
designator J?
CONN RCP USB3.1 TYPEC 24P SMD RA; Manufacturer: Molex; Manufacturer Part Number: 105450-0101; Item Type: USB Connector; Supplier 1: Arrow Electronics; RoHS: Yes; Category: USB Connectors; Stock 1: 1720; Pricing 1: 1=2.36000, 10=1.98100, 25=1.94300, 100=1.88000, 250=1.81800, 500=1.75500, 1000=1.69300 (USD); ComponentLink1URL: http://www.farnell.com/datasheets/2801634.pdf?src-supplier=Farnell; ComponentLink1Description: http://www.farnell.com/datasheets/2801634.pdf?src-supplier=Farnell; ComponentLink2URL: http://www.farnell.com/datasheets/2672741.pdf?src-supplier=Newark; ComponentLink2Description: http://www.farnell.com/datasheets/2672741.pdf?src-supplier=Newark; ComponentLink3URL: https://www.molex.com/pdm_docs/ps/PS-105448-001.pdf?src-supplier=Digi-Key; ComponentLink3Description: https://www.molex.com/pdm_docs/ps/PS-105448-001.pdf?src-supplier=Digi-Key; ComponentLink4URL: https://www.molex.com/pdm_docs/sd/1054500101_sd.pdf?src-supplier=Digi-Key; ComponentLink4Description: https://www.molex.com/pdm_docs/sd/1054500101_sd.pdf?src-supplier=Digi-Key; ComponentLink5URL: http://www.literature.molex.com/SQLImages/kelmscott/Molex/PDF_Images/987651-4081.PDF?src-supplier=Avnet; ComponentLink5Description: http://www.literature.molex.com/SQLImages/kelmscott/Molex/PDF_Images/987651-4081.PDF?src-supplier=Avnet; ComponentLink6URL: http://www.farnell.com/datasheets/2801634.pdf?src-supplier=Newark; ComponentLink6Description: http://www.farnell.com/datasheets/2801634.pdf?src-supplier=Newark; ComponentLink7URL: http://www.farnell.com/datasheets/2801634.pdf?src-supplier=Element14; ComponentLink7Description: http://www.farnell.com/datasheets/2801634.pdf?src-supplier=Element14; ComponentLink8URL: http://www.farnell.com/datasheets/2015275.pdf?src-supplier=Element14; ComponentLink8Description: http://www.farnell.com/datasheets/2015275.pdf?src-supplier=Element14; Supplier Part Number 1: 105450-0101; LCSC Part Number: C134092
footprint 1054500101_
pins: A1 GND_A, A2 TX1+, A3 TX1-, A4 VBUS_A, A5 CC1, A6 D1+, A7 D1-, A8 SBU1, A9 VBUS_A, A10 RX2-, A11 RX2+, A12 GND_A, B1 GND_B, B2 TX2+, B3 TX2-, B4 VBUS_B, B5 CC2, B6 D2+, B7 D2-, B8 SBU2, B9 VBUS_B, B10 RX1-, B11 RX1+, B12 GND_B, S1 SHIELD, S2 SHIELD, S3 SHIELD, S4 SHIELD

## 5027740891
designator J?
1.10mm Pitch microSD Memory Card Connector, Reverse Mount SMT, Push-Push Type; Manufacturer: Molex; Manufacturer Part Number: 5027740891; Number of Contacts: 8; Voltage Rating: 10V; Gender: Male; Pitch: 1.1mm; Supplier: Arrow Electronics; Supplier Part Number: 502774-0891; RoHS: Yes; Category: Memory Connectors; Stock: 11000; Pricing: 6000=1.765 (USD); Mounting Technology: Surface Mount; Contact Material: Copper Alloy,Copper; Contact Plating: Gold; Housing Material: Polymer; Min Operating Temperature: -25°C; Max Operating Temperature: 85°C; Number of Rows: 1; Packaging: Tape and Reel; Termination: Solder; Orientation: Right Angle; Series: microSD Card; Number of Circuits: 8; Length: 14.6mm; Width: 1.8mm; Depth: 16mm; Radiation Hardening: No; Halogen Free: Low Halogen; Reach SVHC Compliant: Unknown; ComponentLink1URL: https://datasheet.ciiva.com/4581/5027740891-memory-card-socket-179575-4581102.pdf?src-supplier=Mouser; ComponentLink1Description: https://datasheet.ciiva.com/4581/5027740891-memory-card-socket-179575-4581102.pdf?src-supplier=Mouser; ComponentLink2URL: https://datasheet.ciiva.com/683/5027740891-sd-683628.pdf?src-supplier=Digikey; ComponentLink2Description: https://datasheet.ciiva.com/683/5027740891-sd-683628.pdf?src-supplier=Digikey; ComponentLink3URL: https://datasheet.ciiva.com/15226/getdatasheetpartid-119109-15226226.pdf?src-supplier=Verical; ComponentLink3Description: https://datasheet.ciiva.com/15226/getdatasheetpartid-119109-15226226.pdf?src-supplier=Verical; ComponentLink4URL: https://datasheet.ciiva.com/11755/0900766b80f752a0-11755064.pdf?src-supplier=Rs; ComponentLink4Description: https://datasheet.ciiva.com/11755/0900766b80f752a0-11755064.pdf?src-supplier=Rs; ComponentLink5URL: https://datasheet.ciiva.com/1104/1499551-1104671.pdf?src-supplier=Element14; ComponentLink5Description: https://datasheet.ciiva.com/1104/1499551-1104671.pdf?src-supplier=Element14; ComponentLink6URL: https://datasheet.ciiva.com/1104/ps-502774-001-1104670.pdf?src-supplier=Element14; ComponentLink6Description: https://datasheet.ciiva.com/1104/ps-502774-001-1104670.pdf?src-supplier=Element14; ComponentLink7URL: https://datasheet.ciiva.com/16655/5027740891-memory-card-socket-16655603.pdf?; ComponentLink7Description: https://datasheet.ciiva.com/16655/5027740891-memory-card-socket-16655603.pdf?; ComponentLink8URL: https://datasheet.ciiva.com/683/5027740891-sd-683629.pdf?src-supplier=Digikey; ComponentLink8Description: https://datasheet.ciiva.com/683/5027740891-sd-683629.pdf?src-supplier=Digikey; ComponentLink9URL: https://datasheet.ciiva.com/683/5027740891-sd-683630.pdf?src-supplier=Digikey; ComponentLink9Description: https://datasheet.ciiva.com/683/5027740891-sd-683630.pdf?src-supplier=Digikey
footprint 5027740891
pins: 1 DAT2, 2 CD/DAT3, 3 CMD, 4 VDD, 5 CLK, 6 VSS, 7 DAT0, 8 DAT1, DN DET_NAIL, SH1 SHIELD, SH2 SHIELD, SH3 SHIELD, SH4 SHIELD, SN SW_NAIL

## 5051101492
designator J?
14 Position FFC, FPC Connector Contacts, Bottom 0.020" (0.50mm) Surface Mount, Right Angle; Manufacturer: Molex; Manufacturer Part Number: 505110-1492; Supplier: Arrow Electronics; Supplier Part Number: 505110-1492; RoHS: Yes; Category: FFC / FPC; Stock: 9000; Pricing: 9000=0.3633, 15000=0.3615 (USD); ComponentLink1URL: http://www.alliedelec.com/m/d/498d8ef60ec1840486550b3bb04c7a47.pdf?src-supplier=Allied+Electronics; ComponentLink1Description: http://www.alliedelec.com/m/d/498d8ef60ec1840486550b3bb04c7a47.pdf?src-supplier=Allied+Electronics; ComponentLink2URL: https://media.digikey.com/pdf/Data%20Sheets/Molex%20PDFs/FFC-FPC_Connectors.pdf?src-supplier=Digikey; ComponentLink2Description: https://media.digikey.com/pdf/Data%20Sheets/Molex%20PDFs/FFC-FPC_Connectors.pdf?src-supplier=Digikey; ComponentLink3URL: https://datasheet.octopart.com/505110-1492-Molex-datasheet-77521073.pdf?src-supplier=Element14; ComponentLink3Description: https://datasheet.octopart.com/505110-1492-Molex-datasheet-77521073.pdf?src-supplier=Element14; ComponentLink4URL: http://www.farnell.com/datasheets/2014276.pdf?src-supplier=Element14; ComponentLink4Description: http://www.farnell.com/datasheets/2014276.pdf?src-supplier=Element14; ComponentLink5URL: https://www.molex.com/datasheets/rohspdf/5051101492_rohs.pdf?src-supplier=Digikey; ComponentLink5Description: https://www.molex.com/datasheets/rohspdf/5051101492_rohs.pdf?src-supplier=Digikey; ComponentLink6URL: https://datasheet.octopart.com/505110-1492-Molex-datasheet-62088043.pdf?src-supplier=Farnell; ComponentLink6Description: https://datasheet.octopart.com/505110-1492-Molex-datasheet-62088043.pdf?src-supplier=Farnell; ComponentLink7URL: https://datasheet.octopart.com/505110-1492-Molex-datasheet-134576216.pdf?src-supplier=TME; ComponentLink7Description: https://datasheet.octopart.com/505110-1492-Molex-datasheet-134576216.pdf?src-supplier=TME; ComponentLink8URL: https://datasheet.octopart.com/505110-1492-Molex-datasheet-154754609.pdf?src-supplier=Master+Electronics; ComponentLink8Description: https://datasheet.octopart.com/505110-1492-Molex-datasheet-154754609.pdf?src-supplier=Master+Electronics; LCSC Part Number: C3169593; Item Type: Connector
footprint 5051101492
pins: 1, 2, 3, 4, 5, 6, 7, 8, 9, 10, 11, 12, 13, 14, S1 SHIELD, S2 SHIELD

## 65800001009
designator J?
FUSE BLOK CARTRIDGE 250V 10A SMD; Manufacturer: Littelfuse Wickmann; Manufacturer Part Number: 65800001009; Item Type: Fuse Holders; Supplier: Digikey; LCSC Part Number: C122783; RoHS: Yes; Stock: 1737; Pricing: 1=2.88, 5=2.384, 10=2.201, 50=1.8256, 100=1.6841, 300=1.4809, 500=1.39448, 1000=1.28466, 5000=1.239 (USD); ComponentLink1URL: https://datasheet.ciiva.com/14119/rm658-659-660-data-e-14119836.pdf?src-supplier=Distrelec; ComponentLink1Description: https://datasheet.ciiva.com/14119/rm658-659-660-data-e-14119836.pdf?src-supplier=Distrelec; ComponentLink2URL: https://datasheet.ciiva.com/12475/658-659-660-lf-050519-12475529.pdf?src-supplier=Mouser; ComponentLink2Description: https://datasheet.ciiva.com/12475/658-659-660-lf-050519-12475529.pdf?src-supplier=Mouser; ComponentLink3URL: https://datasheet.ciiva.com/1270/1480080-1270148.pdf?src-supplier=Element14; ComponentLink3Description: https://datasheet.ciiva.com/1270/1480080-1270148.pdf?src-supplier=Element14; ComponentLink4URL: https://datasheet.ciiva.com/7660/littelfuse-fuse-holder-658-659-660-7660729.pdf?src-supplier=Element14; ComponentLink4Description: https://datasheet.ciiva.com/7660/littelfuse-fuse-holder-658-659-660-7660729.pdf?src-supplier=Element14; ComponentLink5URL: https://datasheet.ciiva.com/7469/658-659-660-lf-050519-7469942.pdf?src-supplier=Digikey; ComponentLink5Description: https://datasheet.ciiva.com/7469/658-659-660-lf-050519-7469942.pdf?src-supplier=Digikey
footprint 65800001009
pins: 1, 2

## 693071010811
designator J?
CONN MICRO SD CARD PUSH-PUSH R/A; Manufacturer: Wurth Electronics; Manufacturer Part Number: 693071010811; Item Type: Memory Connectors; Number of Contacts: 8; Current Rating: 500mA; Insulation Resistance: 1GR; Operating Supply Voltage: 100V; Memory Format: 4498,11064MemoryType; Supplier: Mouser; LCSC Part Number: C2680620; RoHS: Yes; Stock: 22534; Pricing: 1=3.11, 10=3.04, 50=2.68, 100=2.56, 1000=2.19, 10000=2 (USD); Mounting Technology: Surface Mount; Contact Material: Copper Alloy,Copper,Gold; Contact Plating: Gold; Min Operating Temperature: -25°C; Max Operating Temperature: 85°C; Package Quantity: 1; Packaging: Cut Tape; Series: -; Voltage Rating: 100V; Length: 14mm; Width: 15.2mm; Height: 1.98mm; RoHS Compliant: Yes; Reach SVHC Compliant: Unknown; Lead Free: Lead Free; ComponentLink1URL: https://datasheet.ciiva.com/6935/693071010811-6935152.pdf?src-supplier=Digikey; ComponentLink1Description: https://datasheet.ciiva.com/6935/693071010811-6935152.pdf?src-supplier=Digikey; ComponentLink2URL: https://datasheet.ciiva.com/25605/0900766b81113f2e-25605369.pdf?src-supplier=Rs; ComponentLink2Description: https://datasheet.ciiva.com/25605/0900766b81113f2e-25605369.pdf?src-supplier=Rs; ComponentLink3URL: https://datasheet.ciiva.com/1104/1759178-1104796.pdf?src-supplier=Element14; ComponentLink3Description: https://datasheet.ciiva.com/1104/1759178-1104796.pdf?src-supplier=Element14; ComponentLink4URL: https://datasheet.ciiva.com/6935/693071010811-6935146.pdf?src-supplier=Digikey; ComponentLink4Description: https://datasheet.ciiva.com/6935/693071010811-6935146.pdf?src-supplier=Digikey
footprint 693071010811
pins: 1 DAT2, 2 CD/DAT3, 3 CMD, 4 VDD, 5 CLK, 6 VSS, 7 DAT0, 8 DAT1, 9 Card Detect, 10 Card Detect

## A2P SMT-F
designator J?
Magnetic Pogo Pin Connector 2 Positions Pitch 2.5/2.6 MM Spring Loaded Female Strip; Manufacturer Part Number: Pogo Pin Connector 2 Pin Female (2mm Height); ComponentLink1Description: Aliexpress; ComponentLink1URL: https://vi.aliexpress.com/item/1005003511237426.html#nav-description
footprint A2P SMT-F
pins: 1, 2

## AFC07-S15ECA-00
designator J?
SMD,P=0.5mm,Surface Mount，Right Angle; Manufacturer: JUSHUO; Manufacturer Part Number: AFC07-S15ECA-00; Item Type: FFC, FPC Connector; Package: SMD,P=0.5mm,Surface Mount，Right Angle; LCSC Part Number: C262588; ComponentLink1Description: LCSC; ComponentLink1URL: https://www.lcsc.com/product-detail/FFC-FPC-Flat-Flexible-Connector-Assemblies_JUSHUO-AFC07-S15ECA-00_C262588.html
footprint AFC07-S15ECA-00
pins: 1, 2, 3, 4, 5, 6, 7, 8, 9, 10, 11, 12, 13, 14, 15, MP1, MP2

## AFC07-S40FCA-00
designator J?
Slide Lock 40P Bottom Contact Surface Mount, Right Angle 0.5mm SMD,P=0.5mm,Surface Mount,Right Angle FFC, FPC (Flat Flexible) Connector Assemblies ROHS; Manufacturer: JUSHUO; Manufacturer Part Number: AFC07-S40FCA-00; Item Type: FFC/FPC Connector; Supplier: LCSC; LCSC Part Number: C262572; RoHS: No; ComponentLink1Description: LCSC; ComponentLink1URL: https://www.lcsc.com/product-detail/C262572.html?s_z=n_AFC07-S40FCA-00
footprint AFC07-S40FCA-00
pins: 1, 2, 3, 4, 5, 6, 7, 8, 9, 10, 11, 12, 13, 14, 15, 16, 17, 18, 19, 20, 21, 22, 23, 24, 25, 26, 27, 28, 29, 30, 31, 32, 33, 34, 35, 36, 37, 38, 39, 40, MP1, MP2

## AFC11-S32ICA-00
designator J?
Drawer Type 32P Single-sided contact points/Vertical Standing paste 0.5mm SMD,P=0.5mm FFC, FPC (Flat Flexible) Connector Assemblies ROHS; Manufacturer: JUSHUO; Manufacturer Part Number: AFC11-S32ICA-00; Item Type: FFC , FPC Connector; Package: SMD,P=0.5mm; LCSC Part Number: C262506; ComponentLink1Description: LCSC; ComponentLink1URL: https://www.lcsc.com/product-detail/FFC-FPC-Flat-Flexible-Connector-Assemblies_JUSHUO-AFC11-S32ICA-00_C262506.html?s_z=n_AFC11-S32ICA-00
footprint AFC11-S32ICA-00
pins: 1, 2, 3, 4, 5, 6, 7, 8, 9, 10, 11, 12, 13, 14, 15, 16, 17, 18, 19, 20, 21, 22, 23, 24, 25, 26, 27, 28, 29, 30, 31, 32

## AFC24-S40FIC-00
designator J?
Flip type 40P Dual-sided contacts / top and bottom connection Horizontal attachment 0.5mm SMD,P=0.5mm,Surface Mount，Right Angle FFC, FPC (Flat Flexible) Connector Assemblies ROHS; Manufacturer: JUSHUO; Manufacturer Part Number: AFC24-S40FIC-00; Item Type: FFC/FPC Connector; Supplier: LCSC; LCSC Part Number: C262295; RoHS: No; ComponentLink1Description: LCSC; ComponentLink1URL: https://www.lcsc.com/product-detail/FFC-FPC-Flat-Flexible-Connector-Assemblies_JUSHUO-AFC24-S40FIC-00_C262295.html
footprint AFC24-S40FIC-00
pins: 1, 2, 3, 4, 5, 6, 7, 8, 9, 10, 11, 12, 13, 14, 15, 16, 17, 18, 19, 20, 21, 22, 23, 24, 25, 26, 27, 28, 29, 30, 31, 32, 33, 34, 35, 36, 37, 38, 39, 40, MP1, MP2

## BE-13-010
designator J?
Battery Clip Nickel Copper 9V Stacked Battery Button And Strip Battery Connector ROHS; Manufacturer: MYOUNG; Manufacturer Part Number: BE-13-010; LCSC Part Number: C19184112; Item Type: Battery Connector; ComponentLink1Description: LCSC; ComponentLink1URL: https://lcsc.com/product-detail/Button-And-Strip-Battery-Connector_MYOUNG-BE-13-010_C19184112.html?s_z=n_battery%2520holder
footprint BE-13-010
pins: 1 +, 2 -

## BH-18650-B1BA002
designator J?
Battery box 18650 SMD Button And Strip Battery Connector ROHS; Manufacturer: MYOUNG; Manufacturer Part Number: BH-18650-B1BA002; Package: SMD; LCSC Part Number: C2988620; Item Type: Battery Connector; ComponentLink1Description: LCSC; ComponentLink1URL: https://www.lcsc.com/product-detail/Battery-Connectors_MYOUNG-BH-18650-B1BA002_C2988620.html
footprint BH-18650-B1BA002
pins: 1 -, 2 +

## BH-AAA-B5AK001
designator J?
Battery box Tin -25℃~+85℃ Phosphor Bronze No. 7 SMD Button And Strip Battery Connector ROHS; Manufacturer: MYOUNG; Manufacturer Part Number: BH-AAA-B5AK001; Item Type: Battery Holder; Package: SMD; LCSC Part Number: C964882; ComponentLink1Description: LCSC; ComponentLink1URL: https://www.lcsc.com/product-detail/Button-And-Strip-Battery-Connector_MYOUNG-BH-AAA-B5AK001_C964882.html
footprint BH-AAA-B5AK001
pins: 1, 2, 3, 4

## BK-92
designator J?
BATTERY CONTACT CLIP AA PC PIN; Manufacturer: Memory Protection Devices; Manufacturer Part Number: BK-92; Item Type: Battery Holder; Number of Cells: 1; Supplier: Digikey; RoHS: Yes; Stock: 124155; Pricing: 1=0.43, 10=0.353, 50=0.3104, 100=0.2934, 250=0.27248, 500=0.25762, 1000=0.24358, 2500=0.2262, 5000=0.21387 (USD); Mounting Technology: Through Hole,PCB; Series: -; Termination: PC Pin; ComponentLink1URL: https://datasheet.ciiva.com/4/bk-92-datasheet-4254.pdf?src-supplier=Digikey; ComponentLink1Description: https://datasheet.ciiva.com/4/bk-92-datasheet-4254.pdf?src-supplier=Digikey
footprint BK-92
pins: 1